# Altium schematic symbol library 二极管.SchLib: 3 symbols
Pins are listed as number, name and electrical type; pins without a type are passive.

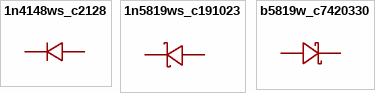
[diagram p0: symbols 1n4148ws_c2128 to b5819w_c7420330]

## 1n4148ws_c2128
designator D??  (value not drawn)
二极管配置:独立式;整流电流:150mA;直流反向耐压(Vr):100V;正向压降(Vf):1.25V@150mA;反向恢复时间(Trr):4ns;; Manufacturer: CJ(江苏长电/长晶); Symbol: 1N4148WS T4; AddInBom: yes; ModelId: db63db13d9e342eb939127d413d6200b; ModelName: SOD-323_L1.8-W1.3-LS2.5-RD; ModelTransform: 104.3305,51.181,0,0,0,0,0,-0.004,0; Diode Configuration: 独立式; Pd - Power Dissipation: 200mW; Current - Rectified: 150mA; Voltage - DC Reverse(Vr): 100V; Non-Repetitive Peak Forward Surge Current: 2A; Reverse Leakage Current (Ir): 1uA@75V; Reverse Recovery Time (trr): 4ns; LCSC Part Name: 丝印T4 100V 150mA; SupplierPart: C2128; ManufacturerPart: 1N4148WS; Supplier Footprint: SOD-323; JLCPCB Part Class: Basic Part; Datasheet: https://item.szlcsc.com/datasheet/1N4148WS/2485.html; Supplier: LCSC; ConvertToPcb: yes; FootprintName: SOD-323_L1.8-W1.3-LS2.5-RD; Voltage - Forward(Vf@If): 1.25V@150mA; Operating Junction Temperature Range: -
footprint SOD-323_L1.8-W1.3-LS2.5-RD
pins: 1 K, 2 A

## 1n5819ws_c191023
designator D??  (value not drawn)
正向压降(Vf):600mV@1A;直流反向耐压(Vr):40V;整流电流:1A;; Manufacturer: Hottech(合科泰); AddInBom: yes; ModelId: db63db13d9e342eb939127d413d6200b; ModelName: SOD-323_L1.8-W1.3-LS2.5-RD; ModelTransform: 104.3305,51.181,0,0,0,0,0,-0.004,0; Voltage - DC Reverse(Vr): 40V; Current - Rectified: 1A; Non-Repetitive Peak Forward Surge Current: 25A; Symbol: 1N5819WS; LCSC Part Name: 电压:40V 电流:1A; SupplierPart: C191023; ManufacturerPart: 1N5819WS; Supplier Footprint: SOD-323; JLCPCB Part Class: Basic Part; Datasheet: https://item.szlcsc.com/datasheet/1N5819WS/213850.html; Supplier: LCSC; ConvertToPcb: yes; FootprintName: SOD-323_L1.8-W1.3-LS2.5-RD; Voltage - Forward(Vf@If): 600mV@1A
footprint SOD-323_L1.8-W1.3-LS2.5-RD
footprint SOD-323_L1.8-W1.3-LS2.5-RD (Footprint not found)
pins: 1 K, 2 A

## b5819w_c7420330
designator D??  (value not drawn)
二极管配置:独立式;正向压降(Vf):600mV@1.0A;直流反向耐压(Vr):40V;整流电流:1A;; Manufacturer: R+O(宏嘉诚); ManufacturerPart: B5819W; AddInBom: yes; ModelId: 5054d9b7be8b429dad093a54b517b4dd; ModelName: SOD-123_L2.7-W1.6-LS3.7-FD; ModelTransform: 145.669,61.024,0,0,0,0,0,0,0; Diode Configuration: 独立式; Voltage - DC Reverse(Vr): 40V; Current - Rectified: 1A; Reverse Leakage Current (Ir): 1mA@30V; Operating Junction Temperature Range: -55℃~+150℃; Non-Repetitive Peak Forward Surge Current: 9A; Symbol: B5819W_C7420330; LCSC Part Name: 电压:40V 电流:1A; SupplierPart: C7420330; Supplier Footprint: SOD-123; JLCPCB Part Class: Extended Part; Datasheet: https://item.szlcsc.com/datasheet/B5819W/8397152.html; Supplier: LCSC; ConvertToPcb: yes; FootprintName: SOD-123_L2.7-W1.6-LS3.7-FD; Voltage - Forward(Vf@If): 600mV@1.0A
footprint SOD-123_L2.7-W1.6-LS3.7-FD
pins: 1 A, 2 K